# Altium footprint library SOT23-3_TO-236AB.PcbLib: 1 footprints
Each footprint in its own frame and in the unit in brackets; x right, y up, seen from the top. Pads: shape width x height; smd on the part's side, far side on the other; paste and mask are expansions set on the pad; w line width, h text height; cw(c..) or ccw(c..) is an arc to the next point about the centre after c.
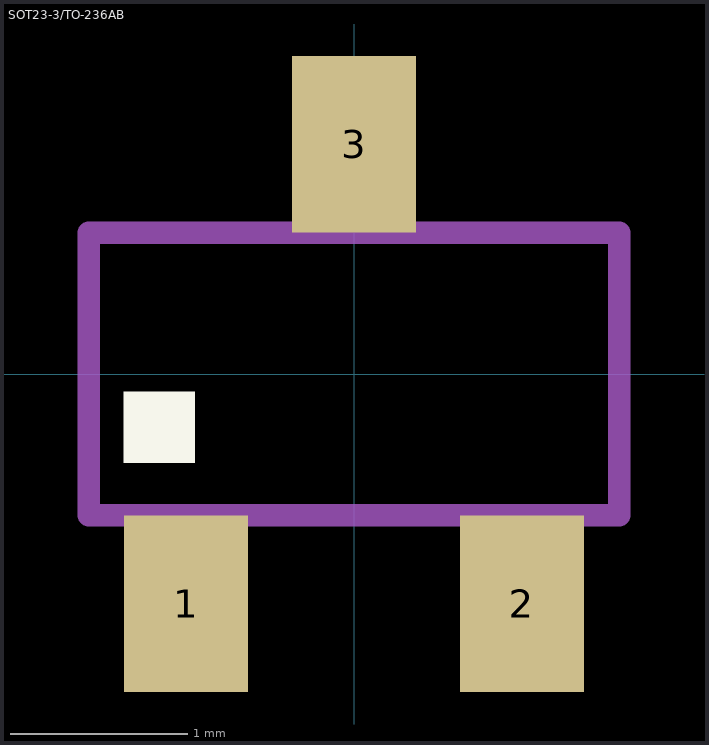
[diagram p0: the footprint, top view; thin cyan lines are the x and y axes]

## SOT23-3/TO-236AB [mm]
pads (3):
  rect 0.7x1 smd: 1(-0.95,-1.3) 2(0.95,-1.3) 3(0,1.3)
Top Overlay:
  region: -0.9,-0.501 -1.303,-0.501 -1.303,-0.1 -0.9,-0.1
Assembly Top:
  region: -0.75,-1.402 -1.152,-1.402 -1.152,-0.8 -0.75,-0.8
  region: 1.15,-1.402 0.751,-1.402 0.751,-0.8 1.15,-0.8
  region: 0.2,0.802 -0.2,0.802 -0.2,1.4 0.2,1.4
  lines w0.127: -1.5,-0.8 1.5,-0.8 1.5,0.8 -1.5,0.8 -1.5,-0.8
3D body "step_temp.STEP": height 1.1, standoff 0, extent -1.45,-1.15 1.45,1.15